# Altium integrated library Pback_lib.IntLib: 2 symbols
Pins are listed as number, name and electrical type; pins without a type are passive.

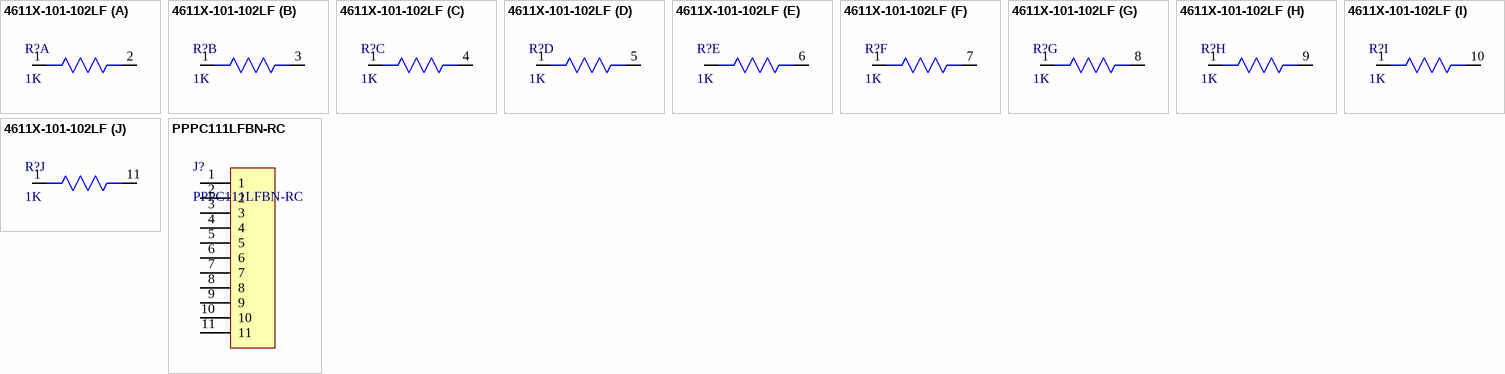
[diagram p0: symbols 4611X-101-102LF to PPPC111LFBN-RC]

## 4611X-101-102LF
designator R?, comment 1K
RES ARRAY 10 RES 1K OHM 11SIP; Manufacturer: Bourns; Manufacturer Part Number: 4611X-101-102LF; Power Rating: 1.38W; Resistance: 1kR; Number of Resistors: 10; Temperature Coefficient: 100ppm/°C; Tolerance: 2%; Voltage Rating: 100V; Circuit Type: Bussed; Power Per Element: 200mW; Supplier 1: Digi-Key; Stock 1: 2011; Pricing 1: 1=0.72, 10=0.531, 25=0.4312, 50=0.375, 100=0.3094, 250=0.26876, 500=0.21876, 1000=0.1735, 5000=0.16438 (USD); Mount: Through Hole; Case/Package: SIP; Number of Pins: 11; Number of Terminals: 11; Min Operating Temperature: -55°C; Max Operating Temperature: 125°C; Packaging: Bulk; Package Quantity: 100; Number of Elements: 10; Termination: Pin; Military Standard: Not; Voltage Rating (DC): 100V; Length: 1.098inch; Height: 0.2inch; Width: 0.098inch; Lead Pitch: 2.54mm; Terminal Pitch: 2.54mm; Depth: 2.49mm; Radiation Hardening: No; REACH SVHC: No SVHC; ComponentLink1URL: https://www.bourns.com/docs/Product-Datasheets/4600x.pdf?src-supplier=Digi-Key; ComponentLink1Description: https://www.bourns.com/docs/Product-Datasheets/4600x.pdf?src-supplier=Digi-Key; ComponentLink2URL: http://www.farnell.com/datasheets/682196.pdf?src-supplier=Element14; ComponentLink2Description: http://www.farnell.com/datasheets/682196.pdf?src-supplier=Element14; ComponentLink3URL: http://www.mouser.com/ds/2/54/600x-776645.pdf?src-supplier=Mouser; ComponentLink3Description: http://www.mouser.com/ds/2/54/600x-776645.pdf?src-supplier=Mouser; ComponentLink4URL: http://www.bourns.com/data/global/pdfs/4600X.pdf?src-supplier=Avnet; ComponentLink4Description: http://www.bourns.com/data/global/pdfs/4600X.pdf?src-supplier=Avnet; Supplier Part Number 1: 4611X-101-102LF-ND
footprint PPPC111LFBN-RC (CONN HDR 11POS 0.1 GOLD PCB)
part A pins: 1, 2
part B pins: 1, 3
part C pins: 1, 4
part D pins: 1, 5
part E pins: 1, 6
part F pins: 1, 7
part G pins: 1, 8
part H pins: 1, 9
part I pins: 1, 10
part J pins: 1, 11

## PPPC111LFBN-RC
designator J?
CONN HDR 11POS 0.1 GOLD PCB; Manufacturer: Sullins; Number of Positions: 11; Connector Type: Header,Socket; Pitch: 0.1inch; Supplier 1: Digi-Key; Manufacturer Part Number: PPPC111LFBN-RC; Stock 1: 804; Pricing 1: 1=0.74, 10=0.654, 100=0.5643, 500=0.4617, 1000=0.4104, 5000=0.3705 (USD); Mount: Through Hole; Color: Black; Contact Plating: Gold; Contact Material: Bronze; Housing Material: Plastic; Package Quantity: 1000; Number of Rows: 1; Packaging: Bulk; Termination: Solder; Length: 28.4mm; Height: 8.5mm; Width: 2.5mm; Lead Free: Lead Free; Supplier Part Number 1: S7044-ND
footprint Header
pins: 1, 2, 3, 4, 5, 6, 7, 8, 9, 10, 11